# Altium footprint library WR-BHD.PcbLib: 220 footprints (part 10 of 14)
Each footprint in its own frame and in the unit in brackets; x right, y up, seen from the top. Pads: shape width x height; smd on the part's side, far side on the other; paste and mask are expansions set on the pad; w line width, h text height; cw(c..) or ccw(c..) is an arc to the next point about the centre after c.
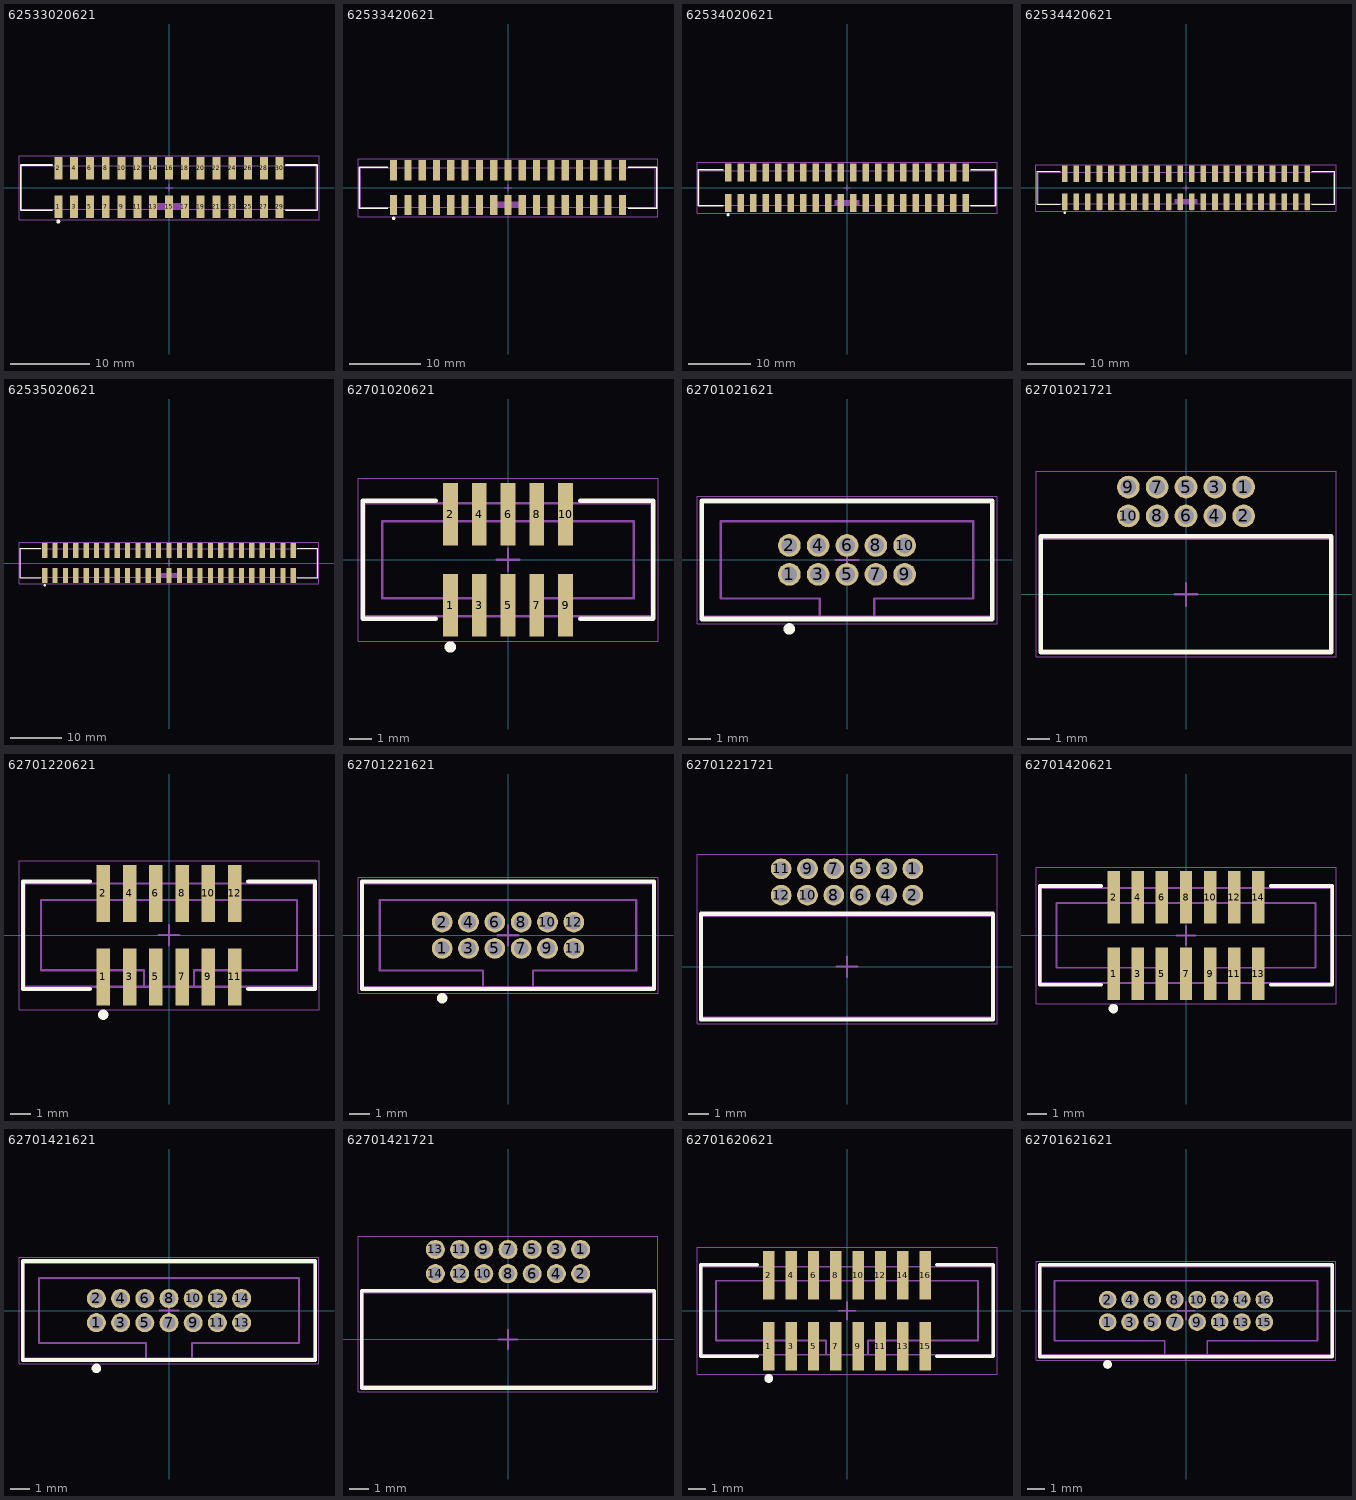
[diagram p9: the footprints below, top view; thin cyan lines are the x and y axes]

## 62533020621 [mm] "2.00mm Male SMT Box Header, 30p"
height 6.8
pads (30):
  rect 1x2.85 smd: 1(-14,-2.425) 2(-14,2.425) 3(-12,-2.425) 4(-12,2.425) 5(-10,-2.425) 6(-10,2.425) 7(-8,-2.425) 8(-8,2.425) 9(-6,-2.425) 10(-6,2.425) 11(-4,-2.425) 12(-4,2.425) 13(-2,-2.425) 14(-2,2.425) 15(0,-2.425) 16(0,2.425) 17(2,-2.425) 18(2,2.425) 19(4,-2.425) 20(4,2.425) 21(6,-2.425) 22(6,2.425) 23(8,-2.425) 24(8,2.425) 25(10,-2.425) 26(10,2.425) 27(12,-2.425) 28(12,2.425) 29(14,-2.425) 30(14,2.425)
Top Overlay:
  circle w0.25: c-14,-4.3 r0.125
  lines w0.2: -14.8,-2.85 -18.775,-2.85 -18.775,2.85 -14.8,2.85 ; 14.8,-2.85 18.775,-2.85 18.775,2.85 14.8,2.85
Top Assembly:
  rectangle: -2,-2.75 2,-1.95
  lines w0.1: -14.25,-2.75 -14.25,-3.75 -13.75,-3.75 -13.75,-2.75 ; -14.25,2.75 -14.25,3.75 -13.75,3.75 -13.75,2.75 ; -12.25,-2.75 -12.25,-3.75 -11.75,-3.75 -11.75,-2.75 ; -12.25,2.75 -12.25,3.75 -11.75,3.75 -11.75,2.75 ; -10.25,-2.75 -10.25,-3.75 -9.75,-3.75 -9.75,-2.75 ; -10.25,2.75 -10.25,3.75 -9.75,3.75 -9.75,2.75 ; -8.25,-2.75 -8.25,-3.75 -7.75,-3.75 -7.75,-2.75 ; -8.25,2.75 -8.25,3.75 -7.75,3.75 -7.75,2.75 ; -6.25,-2.75 -6.25,-3.75 -5.75,-3.75 -5.75,-2.75 ; -6.25,2.75 -6.25,3.75 -5.75,3.75 -5.75,2.75 ; -4.25,-2.75 -4.25,-3.75 -3.75,-3.75 -3.75,-2.75 ; -4.25,2.75 -4.25,3.75 -3.75,3.75 -3.75,2.75 ; -2.25,-2.75 -2.25,-3.75 -1.75,-3.75 -1.75,-2.75 ; -2.25,2.75 -2.25,3.75 -1.75,3.75 -1.75,2.75 ; -0.25,-2.75 -0.25,-3.75 0.25,-3.75 0.25,-2.75 ; -0.25,2.75 -0.25,3.75 0.25,3.75 0.25,2.75 ; 1.75,-2.75 1.75,-3.75 2.25,-3.75 2.25,-2.75 ; 1.75,2.75 1.75,3.75 2.25,3.75 2.25,2.75 ; 3.75,-2.75 3.75,-3.75 4.25,-3.75 4.25,-2.75 ; 3.75,2.75 3.75,3.75 4.25,3.75 4.25,2.75 ; 5.75,-2.75 5.75,-3.75 6.25,-3.75 6.25,-2.75 ; 5.75,2.75 5.75,3.75 6.25,3.75 6.25,2.75 ; 7.75,-2.75 7.75,-3.75 8.25,-3.75 8.25,-2.75 ; 7.75,2.75 7.75,3.75 8.25,3.75 8.25,2.75 ; 9.75,-2.75 9.75,-3.75 10.25,-3.75 10.25,-2.75 ; 9.75,2.75 9.75,3.75 10.25,3.75 10.25,2.75 ; 11.75,-2.75 11.75,-3.75 12.25,-3.75 12.25,-2.75 ; 11.75,2.75 11.75,3.75 12.25,3.75 12.25,2.75 ; 13.75,-2.75 13.75,-3.75 14.25,-3.75 14.25,-2.75 ; 13.75,2.75 13.75,3.75 14.25,3.75 14.25,2.75 ; -18.625,-2.75 18.625,-2.75 18.625,2.75 -18.625,2.75 -18.625,-2.75
Top Designator:
  text ".Designator" at -3.647,-0.357 h1
Top 3D Body:
  rectangle: -2,-2.75 2,-1.95
  lines w0.1: -14.25,-2.75 -14.25,-3.75 -13.75,-3.75 -13.75,-2.75 ; -14.25,2.75 -14.25,3.75 -13.75,3.75 -13.75,2.75 ; -12.25,-2.75 -12.25,-3.75 -11.75,-3.75 -11.75,-2.75 ; -12.25,2.75 -12.25,3.75 -11.75,3.75 -11.75,2.75 ; -10.25,-2.75 -10.25,-3.75 -9.75,-3.75 -9.75,-2.75 ; -10.25,2.75 -10.25,3.75 -9.75,3.75 -9.75,2.75 ; -8.25,-2.75 -8.25,-3.75 -7.75,-3.75 -7.75,-2.75 ; -8.25,2.75 -8.25,3.75 -7.75,3.75 -7.75,2.75 ; -6.25,-2.75 -6.25,-3.75 -5.75,-3.75 -5.75,-2.75 ; -6.25,2.75 -6.25,3.75 -5.75,3.75 -5.75,2.75 ; -4.25,-2.75 -4.25,-3.75 -3.75,-3.75 -3.75,-2.75 ; -4.25,2.75 -4.25,3.75 -3.75,3.75 -3.75,2.75 ; -2.25,-2.75 -2.25,-3.75 -1.75,-3.75 -1.75,-2.75 ; -2.25,2.75 -2.25,3.75 -1.75,3.75 -1.75,2.75 ; -0.25,-2.75 -0.25,-3.75 0.25,-3.75 0.25,-2.75 ; -0.25,2.75 -0.25,3.75 0.25,3.75 0.25,2.75 ; 1.75,-2.75 1.75,-3.75 2.25,-3.75 2.25,-2.75 ; 1.75,2.75 1.75,3.75 2.25,3.75 2.25,2.75 ; 3.75,-2.75 3.75,-3.75 4.25,-3.75 4.25,-2.75 ; 3.75,2.75 3.75,3.75 4.25,3.75 4.25,2.75 ; 5.75,-2.75 5.75,-3.75 6.25,-3.75 6.25,-2.75 ; 5.75,2.75 5.75,3.75 6.25,3.75 6.25,2.75 ; 7.75,-2.75 7.75,-3.75 8.25,-3.75 8.25,-2.75 ; 7.75,2.75 7.75,3.75 8.25,3.75 8.25,2.75 ; 9.75,-2.75 9.75,-3.75 10.25,-3.75 10.25,-2.75 ; 9.75,2.75 9.75,3.75 10.25,3.75 10.25,2.75 ; 11.75,-2.75 11.75,-3.75 12.25,-3.75 12.25,-2.75 ; 11.75,2.75 11.75,3.75 12.25,3.75 12.25,2.75 ; 13.75,-2.75 13.75,-3.75 14.25,-3.75 14.25,-2.75 ; 13.75,2.75 13.75,3.75 14.25,3.75 14.25,2.75 ; -18.625,-2.75 -18.625,2.75 18.625,2.75 18.625,-2.75 -18.625,-2.75
Top Courtyard:
  lines w0.05: -18.975,-4.05 -18.975,4.05 18.975,4.05 18.975,-4.05 -18.975,-4.05
Top Component Center:
  lines w0.1: -0.5,0 0.5,0 ; 0,-0.5 0,0.5
3D body "62533020621 (rev1).stp": height 8.55, standoff 0, extent -18.625,-3.75 18.625,3.75

## 62533420621 [mm] "2.00mm Male SMT Box Header, 34p"
height 6.8
pads (34):
  rect 1x2.85 smd: 1(-16,-2.425) 2(-16,2.425) 3(-14,-2.425) 4(-14,2.425) 5(-12,-2.425) 6(-12,2.425) 7(-10,-2.425) 8(-10,2.425) 9(-8,-2.425) 10(-8,2.425) 11(-6,-2.425) 12(-6,2.425) 13(-4,-2.425) 14(-4,2.425) 15(-2,-2.425) 16(-2,2.425) 17(0,-2.425) 18(0,2.425) 19(2,-2.425) 20(2,2.425) 21(4,-2.425) 22(4,2.425) 23(6,-2.425) 24(6,2.425) 25(8,-2.425) 26(8,2.425) 27(10,-2.425) 28(10,2.425) 29(12,-2.425) 30(12,2.425) 31(14,-2.425) 32(14,2.425) 33(16,-2.425) 34(16,2.425)
Top Overlay:
  circle w0.25: c-16,-4.3 r0.125
  lines w0.2: -16.8,-2.85 -20.775,-2.85 -20.775,2.85 -16.8,2.85 ; 16.8,-2.85 20.775,-2.85 20.775,2.85 16.8,2.85
Top Assembly:
  rectangle: -2,-2.75 2,-1.95
  lines w0.1: -16.25,-2.75 -16.25,-3.75 -15.75,-3.75 -15.75,-2.75 ; -16.25,2.75 -16.25,3.75 -15.75,3.75 -15.75,2.75 ; -14.25,-2.75 -14.25,-3.75 -13.75,-3.75 -13.75,-2.75 ; -14.25,2.75 -14.25,3.75 -13.75,3.75 -13.75,2.75 ; -12.25,-2.75 -12.25,-3.75 -11.75,-3.75 -11.75,-2.75 ; -12.25,2.75 -12.25,3.75 -11.75,3.75 -11.75,2.75 ; -10.25,-2.75 -10.25,-3.75 -9.75,-3.75 -9.75,-2.75 ; -10.25,2.75 -10.25,3.75 -9.75,3.75 -9.75,2.75 ; -8.25,-2.75 -8.25,-3.75 -7.75,-3.75 -7.75,-2.75 ; -8.25,2.75 -8.25,3.75 -7.75,3.75 -7.75,2.75 ; -6.25,-2.75 -6.25,-3.75 -5.75,-3.75 -5.75,-2.75 ; -6.25,2.75 -6.25,3.75 -5.75,3.75 -5.75,2.75 ; -4.25,-2.75 -4.25,-3.75 -3.75,-3.75 -3.75,-2.75 ; -4.25,2.75 -4.25,3.75 -3.75,3.75 -3.75,2.75 ; -2.25,-2.75 -2.25,-3.75 -1.75,-3.75 -1.75,-2.75 ; -2.25,2.75 -2.25,3.75 -1.75,3.75 -1.75,2.75 ; -0.25,-2.75 -0.25,-3.75 0.25,-3.75 0.25,-2.75 ; -0.25,2.75 -0.25,3.75 0.25,3.75 0.25,2.75 ; 1.75,-2.75 1.75,-3.75 2.25,-3.75 2.25,-2.75 ; 1.75,2.75 1.75,3.75 2.25,3.75 2.25,2.75 ; 3.75,-2.75 3.75,-3.75 4.25,-3.75 4.25,-2.75 ; 3.75,2.75 3.75,3.75 4.25,3.75 4.25,2.75 ; 5.75,-2.75 5.75,-3.75 6.25,-3.75 6.25,-2.75 ; 5.75,2.75 5.75,3.75 6.25,3.75 6.25,2.75 ; 7.75,-2.75 7.75,-3.75 8.25,-3.75 8.25,-2.75 ; 7.75,2.75 7.75,3.75 8.25,3.75 8.25,2.75 ; 9.75,-2.75 9.75,-3.75 10.25,-3.75 10.25,-2.75 ; 9.75,2.75 9.75,3.75 10.25,3.75 10.25,2.75 ; 11.75,-2.75 11.75,-3.75 12.25,-3.75 12.25,-2.75 ; 11.75,2.75 11.75,3.75 12.25,3.75 12.25,2.75 ; 13.75,-2.75 13.75,-3.75 14.25,-3.75 14.25,-2.75 ; 13.75,2.75 13.75,3.75 14.25,3.75 14.25,2.75 ; 15.75,-2.75 15.75,-3.75 16.25,-3.75 16.25,-2.75 ; 15.75,2.75 15.75,3.75 16.25,3.75 16.25,2.75 ; -20.625,-2.75 -20.625,2.75 20.625,2.75 20.625,-2.75 -20.625,-2.75
Top Designator:
  text ".Designator" at -3.647,-0.357 h1
Top 3D Body:
  rectangle: -2,-2.75 2,-1.95
  lines w0.1: -16.25,-2.75 -16.25,-3.75 -15.75,-3.75 -15.75,-2.75 ; -16.25,2.75 -16.25,3.75 -15.75,3.75 -15.75,2.75 ; -14.25,-2.75 -14.25,-3.75 -13.75,-3.75 -13.75,-2.75 ; -14.25,2.75 -14.25,3.75 -13.75,3.75 -13.75,2.75 ; -12.25,-2.75 -12.25,-3.75 -11.75,-3.75 -11.75,-2.75 ; -12.25,2.75 -12.25,3.75 -11.75,3.75 -11.75,2.75 ; -10.25,-2.75 -10.25,-3.75 -9.75,-3.75 -9.75,-2.75 ; -10.25,2.75 -10.25,3.75 -9.75,3.75 -9.75,2.75 ; -8.25,-2.75 -8.25,-3.75 -7.75,-3.75 -7.75,-2.75 ; -8.25,2.75 -8.25,3.75 -7.75,3.75 -7.75,2.75 ; -6.25,-2.75 -6.25,-3.75 -5.75,-3.75 -5.75,-2.75 ; -6.25,2.75 -6.25,3.75 -5.75,3.75 -5.75,2.75 ; -4.25,-2.75 -4.25,-3.75 -3.75,-3.75 -3.75,-2.75 ; -4.25,2.75 -4.25,3.75 -3.75,3.75 -3.75,2.75 ; -2.25,-2.75 -2.25,-3.75 -1.75,-3.75 -1.75,-2.75 ; -2.25,2.75 -2.25,3.75 -1.75,3.75 -1.75,2.75 ; -0.25,-2.75 -0.25,-3.75 0.25,-3.75 0.25,-2.75 ; -0.25,2.75 -0.25,3.75 0.25,3.75 0.25,2.75 ; 1.75,-2.75 1.75,-3.75 2.25,-3.75 2.25,-2.75 ; 1.75,2.75 1.75,3.75 2.25,3.75 2.25,2.75 ; 3.75,-2.75 3.75,-3.75 4.25,-3.75 4.25,-2.75 ; 3.75,2.75 3.75,3.75 4.25,3.75 4.25,2.75 ; 5.75,-2.75 5.75,-3.75 6.25,-3.75 6.25,-2.75 ; 5.75,2.75 5.75,3.75 6.25,3.75 6.25,2.75 ; 7.75,-2.75 7.75,-3.75 8.25,-3.75 8.25,-2.75 ; 7.75,2.75 7.75,3.75 8.25,3.75 8.25,2.75 ; 9.75,-2.75 9.75,-3.75 10.25,-3.75 10.25,-2.75 ; 9.75,2.75 9.75,3.75 10.25,3.75 10.25,2.75 ; 11.75,-2.75 11.75,-3.75 12.25,-3.75 12.25,-2.75 ; 11.75,2.75 11.75,3.75 12.25,3.75 12.25,2.75 ; 13.75,-2.75 13.75,-3.75 14.25,-3.75 14.25,-2.75 ; 13.75,2.75 13.75,3.75 14.25,3.75 14.25,2.75 ; 15.75,-2.75 15.75,-3.75 16.25,-3.75 16.25,-2.75 ; 15.75,2.75 15.75,3.75 16.25,3.75 16.25,2.75 ; -20.625,-2.75 20.625,-2.75 20.625,2.75 -20.625,2.75 -20.625,-2.75
Top Courtyard:
  lines w0.05: -20.975,-4.05 20.975,-4.05 20.975,4.05 -20.975,4.05 -20.975,-4.05
Top Component Center:
  lines w0.1: -0.5,0 0.5,0 ; 0,-0.5 0,0.5
3D body "62533420621 (rev1).stp": height 8.55, standoff 0, extent -20.625,-3.75 20.625,3.75

## 62534020621 [mm] "2.00mm Male SMT Box Header, 40p"
height 6.8
pads (40):
  rect 1x2.85 smd: 1(-19,-2.425) 2(-19,2.425) 3(-17,-2.425) 4(-17,2.425) 5(-15,-2.425) 6(-15,2.425) 7(-13,-2.425) 8(-13,2.425) 9(-11,-2.425) 10(-11,2.425) 11(-9,-2.425) 12(-9,2.425) 13(-7,-2.425) 14(-7,2.425) 15(-5,-2.425) 16(-5,2.425) 17(-3,-2.425) 18(-3,2.425) 19(-1,-2.425) 20(-1,2.425) 21(1,-2.425) 22(1,2.425) 23(3,-2.425) 24(3,2.425) 25(5,-2.425) 26(5,2.425) 27(7,-2.425) 28(7,2.425) 29(9,-2.425) 30(9,2.425) 31(11,-2.425) 32(11,2.425) 33(13,-2.425) 34(13,2.425) 35(15,-2.425) 36(15,2.425) 37(17,-2.425) 38(17,2.425) 39(19,-2.425) 40(19,2.425)
Top Overlay:
  circle w0.25: c-19,-4.3 r0.125
  lines w0.2: -19.8,-2.85 -23.775,-2.85 -23.775,2.85 -19.8,2.85 ; 19.8,-2.85 23.775,-2.85 23.775,2.85 19.8,2.85
Top Assembly:
  rectangle: -2,-2.75 2,-1.95
  lines w0.1: -19.25,-2.75 -19.25,-3.75 -18.75,-3.75 -18.75,-2.75 ; -19.25,2.75 -19.25,3.75 -18.75,3.75 -18.75,2.75 ; -17.25,-2.75 -17.25,-3.75 -16.75,-3.75 -16.75,-2.75 ; -17.25,2.75 -17.25,3.75 -16.75,3.75 -16.75,2.75 ; -15.25,-2.75 -15.25,-3.75 -14.75,-3.75 -14.75,-2.75 ; -15.25,2.75 -15.25,3.75 -14.75,3.75 -14.75,2.75 ; -13.25,-2.75 -13.25,-3.75 -12.75,-3.75 -12.75,-2.75 ; -13.25,2.75 -13.25,3.75 -12.75,3.75 -12.75,2.75 ; -11.25,-2.75 -11.25,-3.75 -10.75,-3.75 -10.75,-2.75 ; -11.25,2.75 -11.25,3.75 -10.75,3.75 -10.75,2.75 ; -9.25,-2.75 -9.25,-3.75 -8.75,-3.75 -8.75,-2.75 ; -9.25,2.75 -9.25,3.75 -8.75,3.75 -8.75,2.75 ; -7.25,-2.75 -7.25,-3.75 -6.75,-3.75 -6.75,-2.75 ; -7.25,2.75 -7.25,3.75 -6.75,3.75 -6.75,2.75 ; -5.25,-2.75 -5.25,-3.75 -4.75,-3.75 -4.75,-2.75 ; -5.25,2.75 -5.25,3.75 -4.75,3.75 -4.75,2.75 ; -3.25,-2.75 -3.25,-3.75 -2.75,-3.75 -2.75,-2.75 ; -3.25,2.75 -3.25,3.75 -2.75,3.75 -2.75,2.75 ; -1.25,-2.75 -1.25,-3.75 -0.75,-3.75 -0.75,-2.75 ; -1.25,2.75 -1.25,3.75 -0.75,3.75 -0.75,2.75 ; 0.75,-2.75 0.75,-3.75 1.25,-3.75 1.25,-2.75 ; 0.75,2.75 0.75,3.75 1.25,3.75 1.25,2.75 ; 2.75,-2.75 2.75,-3.75 3.25,-3.75 3.25,-2.75 ; 2.75,2.75 2.75,3.75 3.25,3.75 3.25,2.75 ; 4.75,-2.75 4.75,-3.75 5.25,-3.75 5.25,-2.75 ; 4.75,2.75 4.75,3.75 5.25,3.75 5.25,2.75 ; 6.75,-2.75 6.75,-3.75 7.25,-3.75 7.25,-2.75 ; 6.75,2.75 6.75,3.75 7.25,3.75 7.25,2.75 ; 8.75,-2.75 8.75,-3.75 9.25,-3.75 9.25,-2.75 ; 8.75,2.75 8.75,3.75 9.25,3.75 9.25,2.75 ; 10.75,-2.75 10.75,-3.75 11.25,-3.75 11.25,-2.75 ; 10.75,2.75 10.75,3.75 11.25,3.75 11.25,2.75 ; 12.75,-2.75 12.75,-3.75 13.25,-3.75 13.25,-2.75 ; 12.75,2.75 12.75,3.75 13.25,3.75 13.25,2.75 ; 14.75,-2.75 14.75,-3.75 15.25,-3.75 15.25,-2.75 ; 14.75,2.75 14.75,3.75 15.25,3.75 15.25,2.75 ; 16.75,-2.75 16.75,-3.75 17.25,-3.75 17.25,-2.75 ; 16.75,2.75 16.75,3.75 17.25,3.75 17.25,2.75 ; 18.75,-2.75 18.75,-3.75 19.25,-3.75 19.25,-2.75 ; 18.75,2.75 18.75,3.75 19.25,3.75 19.25,2.75 ; -23.625,-2.75 23.625,-2.75 23.625,2.75 -23.625,2.75 -23.625,-2.75
Top Designator:
  text ".Designator" at -3.647,-0.357 h1
Top 3D Body:
  rectangle: -2,-2.75 2,-1.95
  lines w0.1: -19.25,-2.75 -19.25,-3.75 -18.75,-3.75 -18.75,-2.75 ; -19.25,2.75 -19.25,3.75 -18.75,3.75 -18.75,2.75 ; -17.25,-2.75 -17.25,-3.75 -16.75,-3.75 -16.75,-2.75 ; -17.25,2.75 -17.25,3.75 -16.75,3.75 -16.75,2.75 ; -15.25,-2.75 -15.25,-3.75 -14.75,-3.75 -14.75,-2.75 ; -15.25,2.75 -15.25,3.75 -14.75,3.75 -14.75,2.75 ; -13.25,-2.75 -13.25,-3.75 -12.75,-3.75 -12.75,-2.75 ; -13.25,2.75 -13.25,3.75 -12.75,3.75 -12.75,2.75 ; -11.25,-2.75 -11.25,-3.75 -10.75,-3.75 -10.75,-2.75 ; -11.25,2.75 -11.25,3.75 -10.75,3.75 -10.75,2.75 ; -9.25,-2.75 -9.25,-3.75 -8.75,-3.75 -8.75,-2.75 ; -9.25,2.75 -9.25,3.75 -8.75,3.75 -8.75,2.75 ; -7.25,-2.75 -7.25,-3.75 -6.75,-3.75 -6.75,-2.75 ; -7.25,2.75 -7.25,3.75 -6.75,3.75 -6.75,2.75 ; -5.25,-2.75 -5.25,-3.75 -4.75,-3.75 -4.75,-2.75 ; -5.25,2.75 -5.25,3.75 -4.75,3.75 -4.75,2.75 ; -3.25,-2.75 -3.25,-3.75 -2.75,-3.75 -2.75,-2.75 ; -3.25,2.75 -3.25,3.75 -2.75,3.75 -2.75,2.75 ; -1.25,-2.75 -1.25,-3.75 -0.75,-3.75 -0.75,-2.75 ; -1.25,2.75 -1.25,3.75 -0.75,3.75 -0.75,2.75 ; 0.75,-2.75 0.75,-3.75 1.25,-3.75 1.25,-2.75 ; 0.75,2.75 0.75,3.75 1.25,3.75 1.25,2.75 ; 2.75,-2.75 2.75,-3.75 3.25,-3.75 3.25,-2.75 ; 2.75,2.75 2.75,3.75 3.25,3.75 3.25,2.75 ; 4.75,-2.75 4.75,-3.75 5.25,-3.75 5.25,-2.75 ; 4.75,2.75 4.75,3.75 5.25,3.75 5.25,2.75 ; 6.75,-2.75 6.75,-3.75 7.25,-3.75 7.25,-2.75 ; 6.75,2.75 6.75,3.75 7.25,3.75 7.25,2.75 ; 8.75,-2.75 8.75,-3.75 9.25,-3.75 9.25,-2.75 ; 8.75,2.75 8.75,3.75 9.25,3.75 9.25,2.75 ; 10.75,-2.75 10.75,-3.75 11.25,-3.75 11.25,-2.75 ; 10.75,2.75 10.75,3.75 11.25,3.75 11.25,2.75 ; 12.75,-2.75 12.75,-3.75 13.25,-3.75 13.25,-2.75 ; 12.75,2.75 12.75,3.75 13.25,3.75 13.25,2.75 ; 14.75,-2.75 14.75,-3.75 15.25,-3.75 15.25,-2.75 ; 14.75,2.75 14.75,3.75 15.25,3.75 15.25,2.75 ; 16.75,-2.75 16.75,-3.75 17.25,-3.75 17.25,-2.75 ; 16.75,2.75 16.75,3.75 17.25,3.75 17.25,2.75 ; 18.75,-2.75 18.75,-3.75 19.25,-3.75 19.25,-2.75 ; 18.75,2.75 18.75,3.75 19.25,3.75 19.25,2.75 ; -23.625,-2.75 -23.625,2.75 23.625,2.75 23.625,-2.75 -23.625,-2.75
Top Courtyard:
  lines w0.05: -23.975,-4.05 -23.975,4.05 23.975,4.05 23.975,-4.05 -23.975,-4.05
Top Component Center:
  lines w0.1: -0.5,0 0.5,0 ; 0,-0.5 0,0.5
3D body "62534020621 (rev1).stp": height 8.55, standoff 0, extent -23.625,-3.75 23.625,3.75

## 62534420621 [mm] "2.00mm Male SMT Box Header, 44p"
height 6.8
pads (44):
  rect 1x2.85 smd: 1(-21,-2.425) 2(-21,2.425) 3(-19,-2.425) 4(-19,2.425) 5(-17,-2.425) 6(-17,2.425) 7(-15,-2.425) 8(-15,2.425) 9(-13,-2.425) 10(-13,2.425) 11(-11,-2.425) 12(-11,2.425) 13(-9,-2.425) 14(-9,2.425) 15(-7,-2.425) 16(-7,2.425) 17(-5,-2.425) 18(-5,2.425) 19(-3,-2.425) 20(-3,2.425) 21(-1,-2.425) 22(-1,2.425) 23(1,-2.425) 24(1,2.425) 25(3,-2.425) 26(3,2.425) 27(5,-2.425) 28(5,2.425) 29(7,-2.425) 30(7,2.425) 31(9,-2.425) 32(9,2.425) 33(11,-2.425) 34(11,2.425) 35(13,-2.425) 36(13,2.425) 37(15,-2.425) 38(15,2.425) 39(17,-2.425) 40(17,2.425) 41(19,-2.425) 42(19,2.425) 43(21,-2.425) 44(21,2.425)
Top Overlay:
  circle w0.25: c-21,-4.3 r0.125
  lines w0.2: -21.8,-2.85 -25.775,-2.85 -25.775,2.85 -21.8,2.85 ; 21.8,-2.85 25.775,-2.85 25.775,2.85 21.8,2.85
Top Assembly:
  rectangle: -2,-2.75 2,-1.95
  lines w0.1: -21.25,-2.75 -21.25,-3.75 -20.75,-3.75 -20.75,-2.75 ; -21.25,2.75 -21.25,3.75 -20.75,3.75 -20.75,2.75 ; -19.25,-2.75 -19.25,-3.75 -18.75,-3.75 -18.75,-2.75 ; -19.25,2.75 -19.25,3.75 -18.75,3.75 -18.75,2.75 ; -17.25,-2.75 -17.25,-3.75 -16.75,-3.75 -16.75,-2.75 ; -17.25,2.75 -17.25,3.75 -16.75,3.75 -16.75,2.75 ; -15.25,-2.75 -15.25,-3.75 -14.75,-3.75 -14.75,-2.75 ; -15.25,2.75 -15.25,3.75 -14.75,3.75 -14.75,2.75 ; -13.25,-2.75 -13.25,-3.75 -12.75,-3.75 -12.75,-2.75 ; -13.25,2.75 -13.25,3.75 -12.75,3.75 -12.75,2.75 ; -11.25,-2.75 -11.25,-3.75 -10.75,-3.75 -10.75,-2.75 ; -11.25,2.75 -11.25,3.75 -10.75,3.75 -10.75,2.75 ; -9.25,-2.75 -9.25,-3.75 -8.75,-3.75 -8.75,-2.75 ; -9.25,2.75 -9.25,3.75 -8.75,3.75 -8.75,2.75 ; -7.25,-2.75 -7.25,-3.75 -6.75,-3.75 -6.75,-2.75 ; -7.25,2.75 -7.25,3.75 -6.75,3.75 -6.75,2.75 ; -5.25,-2.75 -5.25,-3.75 -4.75,-3.75 -4.75,-2.75 ; -5.25,2.75 -5.25,3.75 -4.75,3.75 -4.75,2.75 ; -3.25,-2.75 -3.25,-3.75 -2.75,-3.75 -2.75,-2.75 ; -3.25,2.75 -3.25,3.75 -2.75,3.75 -2.75,2.75 ; -1.25,-2.75 -1.25,-3.75 -0.75,-3.75 -0.75,-2.75 ; -1.25,2.75 -1.25,3.75 -0.75,3.75 -0.75,2.75 ; 0.75,-2.75 0.75,-3.75 1.25,-3.75 1.25,-2.75 ; 0.75,2.75 0.75,3.75 1.25,3.75 1.25,2.75 ; 2.75,-2.75 2.75,-3.75 3.25,-3.75 3.25,-2.75 ; 2.75,2.75 2.75,3.75 3.25,3.75 3.25,2.75 ; 4.75,-2.75 4.75,-3.75 5.25,-3.75 5.25,-2.75 ; 4.75,2.75 4.75,3.75 5.25,3.75 5.25,2.75 ; 6.75,-2.75 6.75,-3.75 7.25,-3.75 7.25,-2.75 ; 6.75,2.75 6.75,3.75 7.25,3.75 7.25,2.75 ; 8.75,-2.75 8.75,-3.75 9.25,-3.75 9.25,-2.75 ; 8.75,2.75 8.75,3.75 9.25,3.75 9.25,2.75 ; 10.75,-2.75 10.75,-3.75 11.25,-3.75 11.25,-2.75 ; 10.75,2.75 10.75,3.75 11.25,3.75 11.25,2.75 ; 12.75,-2.75 12.75,-3.75 13.25,-3.75 13.25,-2.75 ; 12.75,2.75 12.75,3.75 13.25,3.75 13.25,2.75 ; 14.75,-2.75 14.75,-3.75 15.25,-3.75 15.25,-2.75 ; 14.75,2.75 14.75,3.75 15.25,3.75 15.25,2.75 ; 16.75,-2.75 16.75,-3.75 17.25,-3.75 17.25,-2.75 ; 16.75,2.75 16.75,3.75 17.25,3.75 17.25,2.75 ; 18.75,-2.75 18.75,-3.75 19.25,-3.75 19.25,-2.75 ; 18.75,2.75 18.75,3.75 19.25,3.75 19.25,2.75 ; 20.75,-2.75 20.75,-3.75 21.25,-3.75 21.25,-2.75 ; 20.75,2.75 20.75,3.75 21.25,3.75 21.25,2.75 ; -25.625,-2.75 25.625,-2.75 25.625,2.75 -25.625,2.75 -25.625,-2.75
Top Designator:
  text ".Designator" at -3.647,-0.357 h1
Top 3D Body:
  rectangle: -2,-2.75 2,-1.95
  lines w0.1: -21.25,-2.75 -21.25,-3.75 -20.75,-3.75 -20.75,-2.75 ; -21.25,2.75 -21.25,3.75 -20.75,3.75 -20.75,2.75 ; -19.25,-2.75 -19.25,-3.75 -18.75,-3.75 -18.75,-2.75 ; -19.25,2.75 -19.25,3.75 -18.75,3.75 -18.75,2.75 ; -17.25,-2.75 -17.25,-3.75 -16.75,-3.75 -16.75,-2.75 ; -17.25,2.75 -17.25,3.75 -16.75,3.75 -16.75,2.75 ; -15.25,-2.75 -15.25,-3.75 -14.75,-3.75 -14.75,-2.75 ; -15.25,2.75 -15.25,3.75 -14.75,3.75 -14.75,2.75 ; -13.25,-2.75 -13.25,-3.75 -12.75,-3.75 -12.75,-2.75 ; -13.25,2.75 -13.25,3.75 -12.75,3.75 -12.75,2.75 ; -11.25,-2.75 -11.25,-3.75 -10.75,-3.75 -10.75,-2.75 ; -11.25,2.75 -11.25,3.75 -10.75,3.75 -10.75,2.75 ; -9.25,-2.75 -9.25,-3.75 -8.75,-3.75 -8.75,-2.75 ; -9.25,2.75 -9.25,3.75 -8.75,3.75 -8.75,2.75 ; -7.25,-2.75 -7.25,-3.75 -6.75,-3.75 -6.75,-2.75 ; -7.25,2.75 -7.25,3.75 -6.75,3.75 -6.75,2.75 ; -5.25,-2.75 -5.25,-3.75 -4.75,-3.75 -4.75,-2.75 ; -5.25,2.75 -5.25,3.75 -4.75,3.75 -4.75,2.75 ; -3.25,-2.75 -3.25,-3.75 -2.75,-3.75 -2.75,-2.75 ; -3.25,2.75 -3.25,3.75 -2.75,3.75 -2.75,2.75 ; -1.25,-2.75 -1.25,-3.75 -0.75,-3.75 -0.75,-2.75 ; -1.25,2.75 -1.25,3.75 -0.75,3.75 -0.75,2.75 ; 0.75,-2.75 0.75,-3.75 1.25,-3.75 1.25,-2.75 ; 0.75,2.75 0.75,3.75 1.25,3.75 1.25,2.75 ; 2.75,-2.75 2.75,-3.75 3.25,-3.75 3.25,-2.75 ; 2.75,2.75 2.75,3.75 3.25,3.75 3.25,2.75 ; 4.75,-2.75 4.75,-3.75 5.25,-3.75 5.25,-2.75 ; 4.75,2.75 4.75,3.75 5.25,3.75 5.25,2.75 ; 6.75,-2.75 6.75,-3.75 7.25,-3.75 7.25,-2.75 ; 6.75,2.75 6.75,3.75 7.25,3.75 7.25,2.75 ; 8.75,-2.75 8.75,-3.75 9.25,-3.75 9.25,-2.75 ; 8.75,2.75 8.75,3.75 9.25,3.75 9.25,2.75 ; 10.75,-2.75 10.75,-3.75 11.25,-3.75 11.25,-2.75 ; 10.75,2.75 10.75,3.75 11.25,3.75 11.25,2.75 ; 12.75,-2.75 12.75,-3.75 13.25,-3.75 13.25,-2.75 ; 12.75,2.75 12.75,3.75 13.25,3.75 13.25,2.75 ; 14.75,-2.75 14.75,-3.75 15.25,-3.75 15.25,-2.75 ; 14.75,2.75 14.75,3.75 15.25,3.75 15.25,2.75 ; 16.75,-2.75 16.75,-3.75 17.25,-3.75 17.25,-2.75 ; 16.75,2.75 16.75,3.75 17.25,3.75 17.25,2.75 ; 18.75,-2.75 18.75,-3.75 19.25,-3.75 19.25,-2.75 ; 18.75,2.75 18.75,3.75 19.25,3.75 19.25,2.75 ; 20.75,-2.75 20.75,-3.75 21.25,-3.75 21.25,-2.75 ; 20.75,2.75 20.75,3.75 21.25,3.75 21.25,2.75 ; -25.625,-2.75 -25.625,2.75 25.625,2.75 25.625,-2.75 -25.625,-2.75
Top Courtyard:
  lines w0.05: -25.975,-4.05 -25.975,4.05 25.975,4.05 25.975,-4.05 -25.975,-4.05
Top Component Center:
  lines w0.1: -0.5,0 0.5,0 ; 0,-0.5 0,0.5
3D body "62534420621 (rev1).stp": height 8.55, standoff 0, extent -25.625,-3.75 25.625,3.75

## 62535020621 [mm] "2.00mm Male SMT Box Header, 50p"
height 6.8
pads (50):
  rect 1x2.85 smd: 1(-24,-2.425) 2(-24,2.425) 3(-22,-2.425) 4(-22,2.425) 5(-20,-2.425) 6(-20,2.425) 7(-18,-2.425) 8(-18,2.425) 9(-16,-2.425) 10(-16,2.425) 11(-14,-2.425) 12(-14,2.425) 13(-12,-2.425) 14(-12,2.425) 15(-10,-2.425) 16(-10,2.425) 17(-8,-2.425) 18(-8,2.425) 19(-6,-2.425) 20(-6,2.425) 21(-4,-2.425) 22(-4,2.425) 23(-2,-2.425) 24(-2,2.425) 25(0,-2.425) 26(0,2.425) 27(2,-2.425) 28(2,2.425) 29(4,-2.425) 30(4,2.425) 31(6,-2.425) 32(6,2.425) 33(8,-2.425) 34(8,2.425) 35(10,-2.425) 36(10,2.425) 37(12,-2.425) 38(12,2.425) 39(14,-2.425) 40(14,2.425) 41(16,-2.425) 42(16,2.425) 43(18,-2.425) 44(18,2.425) 45(20,-2.425) 46(20,2.425) 47(22,-2.425) 48(22,2.425) 49(24,-2.425) 50(24,2.425)
Top Overlay:
  circle w0.25: c-24,-4.3 r0.125
  lines w0.2: -24.8,-2.85 -28.775,-2.85 -28.775,2.85 -24.8,2.85 ; 24.8,-2.85 28.775,-2.85 28.775,2.85 24.8,2.85
Top Assembly:
  drawing of 155 lines, arcs and shapes, not listed
Top Designator:
  text ".Designator" at -3.647,-0.357 h1
Top 3D Body:
  drawing of 155 lines, arcs and shapes, not listed
Top Courtyard:
  lines w0.05: -28.975,-4.05 -28.975,4.05 28.975,4.05 28.975,-4.05 -28.975,-4.05
Top Component Center:
  lines w0.1: -0.5,0 0.5,0 ; 0,-0.5 0,0.5
3D body "62535020621 (rev1).stp": height 8.55, standoff 0, extent -28.625,-3.75 28.625,3.75

## 62701020621 [mm] "Boc Header SMT type, 10p"
height 5.3
pads (10):
  rect 0.65x2.76 smd: 1(-2.54,-2.02) 2(-2.54,2.02) 3(-1.27,-2.02) 4(-1.27,2.02) 5(0,-2.02) 6(0,2.02) 7(1.27,-2.02) 8(1.27,2.02) 9(2.54,-2.02) 10(2.54,2.02)
Top Overlay:
  circle w0.25: c-2.55,-3.85 r0.125
  lines w0.2: -3.2,-2.6 -6.425,-2.6 -6.425,2.6 -3.2,2.6 ; 3.2,-2.6 6.425,-2.6 6.425,2.6 3.2,2.6
Top Assembly:
  lines w0.1: -1.2,-2.5 -1.2,-1.7 -5.55,-1.7 -5.55,1.7 5.55,1.7 5.55,-1.7 1.2,-1.7 1.2,-2.5 ; -6.35,-2.5 -6.35,2.5 6.35,2.5 6.35,-2.5 -6.35,-2.5
Top Designator:
  text ".Designator" at -3.647,-0.357 h1
Top 3D Body:
  lines w0.1: -1.2,-2.5 -1.2,-1.7 -5.55,-1.7 -5.55,1.7 5.55,1.7 5.55,-1.7 1.2,-1.7 1.2,-2.5 ; -6.35,-2.5 6.35,-2.5 6.35,2.5 -6.35,2.5 -6.35,-2.5
Top Courtyard:
  lines w0.05: -6.625,-3.6 -6.625,3.6 6.625,3.6 6.625,-3.6 -6.625,-3.6
Top Component Center:
  lines w0.1: -0.5,0 0.5,0 ; 0,-0.5 0,0.5
3D body "62701020621.stp": height 5.2, standoff 0, extent -6.35,-2.8 6.35,2.8

## 62701021621 [mm] "1.27x1.27mm Pitch Box Header Straight Type, 10p"
height 4.9
pads (10):
  round 1 hole 0.7: 1(-2.54,-0.635) 2(-2.54,0.635) 3(-1.27,-0.635) 4(-1.27,0.635) 5(0,-0.635) 6(0,0.635) 7(1.27,-0.635) 8(1.27,0.635) 9(2.54,-0.635) 10(2.54,0.635)
Top Overlay:
  circle w0.25: c-2.54,-3.035 r0.125
  lines w0.2: -6.4,-2.6 6.4,-2.6 6.4,2.6 -6.4,2.6 -6.4,-2.6
Top Assembly:
  lines w0.1: -1.2,-2.5 -1.2,-1.7 -5.55,-1.7 -5.55,1.7 5.55,1.7 5.55,-1.7 1.2,-1.7 1.2,-2.5 ; -6.35,-2.5 6.35,-2.5 6.35,2.5 -6.35,2.5 -6.35,-2.5
Top Designator:
  text ".Designator" at -3.647,-0.357 h1
Top 3D Body:
  lines w0.1: -1.2,-2.5 -1.2,-1.7 -5.55,-1.7 -5.55,1.7 5.55,1.7 5.55,-1.7 1.2,-1.7 1.2,-2.5 ; -6.35,-2.5 -6.35,2.5 6.35,2.5 6.35,-2.5 -6.35,-2.5
Top Courtyard:
  lines w0.05: -6.6,-2.8 6.6,-2.8 6.6,2.8 -6.6,2.8 -6.6,-2.8
Top Component Center:
  lines w0.1: -0.5,0 0.5,0 ; 0,-0.5 0,0.5
3D body "62701021621.stp": height 4.93, standoff -2.37, extent -6.35,-2.55 6.35,2.5

## 62701021721 [mm] "1.27x1.27mm Pitch Box Header Right Angle Type, 10p"
height 5
pads (10):
  round 1 hole 0.7: 1(2.54,4.72) 2(2.54,3.45) 3(1.27,4.72) 4(1.27,3.45) 5(0,4.72) 6(0,3.45) 7(-1.27,4.72) 8(-1.27,3.45) 9(-2.54,4.72) 10(-2.54,3.45)
Top Overlay:
  lines w0.2: -6.4,-2.55 -6.4,2.55 6.4,2.55 6.4,-2.55 -6.4,-2.55
Top Assembly:
  lines w0.1: -6.35,-2.45 6.35,-2.45 6.35,2.45 -6.35,2.45 -6.35,-2.45
Top Designator:
  text ".Designator" at -3.647,-0.357 h1
Top 3D Body:
  lines w0.1: -6.35,-2.45 -6.35,2.45 6.35,2.45 6.35,-2.45 -6.35,-2.45
Top Courtyard:
  lines w0.05: -6.6,-2.75 -6.6,5.42 6.6,5.42 6.6,-2.75 -6.6,-2.75
Top Component Center:
  lines w0.1: -0.5,0 0.5,0 ; 0,-0.5 0,0.5
3D body "62701021721.stp": height 5.08, standoff -2.37, extent -6.35,-2.45 6.35,4.92

## 62701220621 [mm] "Boc Header SMT type, 12p"
height 5.3
pads (12):
  rect 0.65x2.76 smd: 1(-3.175,-2.02) 2(-3.175,2.02) 3(-1.905,-2.02) 4(-1.905,2.02) 5(-0.635,-2.02) 6(-0.635,2.02) 7(0.635,-2.02) 8(0.635,2.02) 9(1.905,-2.02) 10(1.905,2.02) 11(3.175,-2.02) 12(3.175,2.02)
Top Overlay:
  circle w0.25: c-3.185,-3.85 r0.125
  lines w0.2: -3.835,-2.6 -7.06,-2.6 -7.06,2.6 -3.835,2.6 ; 3.835,-2.6 7.06,-2.6 7.06,2.6 3.835,2.6
Top Assembly:
  lines w0.1: -1.2,-2.5 -1.2,-1.7 -6.185,-1.7 -6.185,1.7 6.185,1.7 6.185,-1.7 1.2,-1.7 1.2,-2.5 ; -6.985,-2.5 6.985,-2.5 6.985,2.5 -6.985,2.5 -6.985,-2.5
Top Designator:
  text ".Designator" at -3.647,-0.357 h1
Top 3D Body:
  lines w0.1: -1.2,-2.5 -1.2,-1.7 -6.185,-1.7 -6.185,1.7 6.185,1.7 6.185,-1.7 1.2,-1.7 1.2,-2.5 ; -6.985,-2.5 -6.985,2.5 6.985,2.5 6.985,-2.5 -6.985,-2.5
Top Courtyard:
  lines w0.05: -7.26,-3.6 7.26,-3.6 7.26,3.6 -7.26,3.6 -7.26,-3.6
Top Component Center:
  lines w0.1: -0.5,0 0.5,0 ; 0,-0.5 0,0.5
3D body "62701220621.stp": height 5.2, standoff -0.04, extent -6.985,-2.8 6.985,2.8

## 62701221621 [mm] "1.27x1.27mm Pitch Box Header Straight Type, 12p"
height 4.9
pads (12):
  round 1 hole 0.7: 1(-3.175,-0.635) 2(-3.175,0.635) 3(-1.905,-0.635) 4(-1.905,0.635) 5(-0.635,-0.635) 6(-0.635,0.635) 7(0.635,-0.635) 8(0.635,0.635) 9(1.905,-0.635) 10(1.905,0.635) 11(3.175,-0.635) 12(3.175,0.635)
Top Overlay:
  circle w0.25: c-3.175,-3.035 r0.125
  lines w0.2: -7.035,-2.6 7.035,-2.6 7.035,2.6 -7.035,2.6 -7.035,-2.6
Top Assembly:
  lines w0.1: -1.2,-2.5 -1.2,-1.7 -6.185,-1.7 -6.185,1.7 6.185,1.7 6.185,-1.7 1.2,-1.7 1.2,-2.5 ; -6.985,-2.5 6.985,-2.5 6.985,2.5 -6.985,2.5 -6.985,-2.5
Top Designator:
  text ".Designator" at -3.647,-0.357 h1
Top 3D Body:
  lines w0.1: -1.2,-2.5 -1.2,-1.7 -6.185,-1.7 -6.185,1.7 6.185,1.7 6.185,-1.7 1.2,-1.7 1.2,-2.5 ; -6.985,-2.5 -6.985,2.5 6.985,2.5 6.985,-2.5 -6.985,-2.5
Top Courtyard:
  lines w0.05: -7.235,-2.8 7.235,-2.8 7.235,2.8 -7.235,2.8 -7.235,-2.8
Top Component Center:
  lines w0.1: -0.5,0 0.5,0 ; 0,-0.5 0,0.5
3D body "62701221621.stp": height 4.93, standoff -2.37, extent -6.985,-2.55 6.985,2.5

## 62701221721 [mm] "1.27x1.27mm Pitch Box Header Right Angle Type, 12p"
height 5
pads (12):
  round 1 hole 0.7: 1(3.175,4.72) 2(3.175,3.45) 3(1.905,4.72) 4(1.905,3.45) 5(0.635,4.72) 6(0.635,3.45) 7(-0.635,4.72) 8(-0.635,3.45) 9(-1.905,4.72) 10(-1.905,3.45) 11(-3.175,4.72) 12(-3.175,3.45)
Top Overlay:
  lines w0.2: -7.035,-2.55 -7.035,2.55 7.035,2.55 7.035,-2.55 -7.035,-2.55
Top Assembly:
  lines w0.1: -6.985,-2.45 6.985,-2.45 6.985,2.45 -6.985,2.45 -6.985,-2.45
Top Designator:
  text ".Designator" at -3.647,-0.357 h1
Top 3D Body:
  lines w0.1: -6.985,-2.45 -6.985,2.45 6.985,2.45 6.985,-2.45 -6.985,-2.45
Top Courtyard:
  lines w0.05: -7.235,-2.75 -7.235,5.42 7.235,5.42 7.235,-2.75 -7.235,-2.75
Top Component Center:
  lines w0.1: -0.5,0 0.5,0 ; 0,-0.5 0,0.5
3D body "62701221721.stp": height 5.08, standoff -2.37, extent -6.985,-2.45 6.985,4.92

## 62701420621 [mm] "Boc Header SMT type, 14p"
height 5.3
pads (14):
  rect 0.65x2.76 smd: 1(-3.81,-2.02) 2(-3.81,2.02) 3(-2.54,-2.02) 4(-2.54,2.02) 5(-1.27,-2.02) 6(-1.27,2.02) 7(0,-2.02) 8(0,2.02) 9(1.27,-2.02) 10(1.27,2.02) 11(2.54,-2.02) 12(2.54,2.02) 13(3.81,-2.02) 14(3.81,2.02)
Top Overlay:
  circle w0.25: c-3.82,-3.85 r0.125
  lines w0.2: -4.47,-2.6 -7.695,-2.6 -7.695,2.6 -4.47,2.6 ; 4.47,-2.6 7.695,-2.6 7.695,2.6 4.47,2.6
Top Assembly:
  lines w0.1: -1.2,-2.5 -1.2,-1.7 -6.82,-1.7 -6.82,1.7 6.82,1.7 6.82,-1.7 1.2,-1.7 1.2,-2.5 ; -7.62,-2.5 -7.62,2.5 7.62,2.5 7.62,-2.5 -7.62,-2.5
Top Designator:
  text ".Designator" at -3.647,-0.357 h1
Top 3D Body:
  lines w0.1: -1.2,-2.5 -1.2,-1.7 -6.82,-1.7 -6.82,1.7 6.82,1.7 6.82,-1.7 1.2,-1.7 1.2,-2.5 ; -7.62,-2.5 7.62,-2.5 7.62,2.5 -7.62,2.5 -7.62,-2.5
Top Courtyard:
  lines w0.05: -7.895,-3.6 -7.895,3.6 7.895,3.6 7.895,-3.6 -7.895,-3.6
Top Component Center:
  lines w0.1: -0.5,0 0.5,0 ; 0,-0.5 0,0.5
3D body "62701420621.stp": height 5.2, standoff -0.04, extent -7.62,-2.8 7.62,2.8

## 62701421621 [mm] "1.27x1.27mm Pitch Box Header Straight Type, 14p"
height 4.9
pads (14):
  round 1 hole 0.7: 1(-3.81,-0.635) 2(-3.81,0.635) 3(-2.54,-0.635) 4(-2.54,0.635) 5(-1.27,-0.635) 6(-1.27,0.635) 7(0,-0.635) 8(0,0.635) 9(1.27,-0.635) 10(1.27,0.635) 11(2.54,-0.635) 12(2.54,0.635) 13(3.81,-0.635) 14(3.81,0.635)
Top Overlay:
  circle w0.25: c-3.81,-3.035 r0.125
  lines w0.2: -7.67,-2.6 7.67,-2.6 7.67,2.6 -7.67,2.6 -7.67,-2.6
Top Assembly:
  lines w0.1: -1.2,-2.5 -1.2,-1.7 -6.82,-1.7 -6.82,1.7 6.82,1.7 6.82,-1.7 1.2,-1.7 1.2,-2.5 ; -7.62,-2.5 7.62,-2.5 7.62,2.5 -7.62,2.5 -7.62,-2.5
Top Designator:
  text ".Designator" at -3.647,-0.357 h1
Top 3D Body:
  lines w0.1: -1.2,-2.5 -1.2,-1.7 -6.82,-1.7 -6.82,1.7 6.82,1.7 6.82,-1.7 1.2,-1.7 1.2,-2.5 ; -7.62,-2.5 -7.62,2.5 7.62,2.5 7.62,-2.5 -7.62,-2.5
Top Courtyard:
  lines w0.05: -7.87,-2.8 7.87,-2.8 7.87,2.8 -7.87,2.8 -7.87,-2.8
Top Component Center:
  lines w0.1: -0.5,0 0.5,0 ; 0,-0.5 0,0.5
3D body "62701421621.stp": height 4.93, standoff -2.37, extent -7.62,-2.55 7.62,2.5

## 62701421721 [mm] "1.27x1.27mm Pitch Box Header Right Angle Type, 14p"
height 5
pads (14):
  round 1 hole 0.7: 1(3.81,4.72) 2(3.81,3.45) 3(2.54,4.72) 4(2.54,3.45) 5(1.27,4.72) 6(1.27,3.45) 7(0,4.72) 8(0,3.45) 9(-1.27,4.72) 10(-1.27,3.45) 11(-2.54,4.72) 12(-2.54,3.45) 13(-3.81,4.72) 14(-3.81,3.45)
Top Overlay:
  lines w0.2: -7.67,-2.55 7.67,-2.55 7.67,2.55 -7.67,2.55 -7.67,-2.55
Top Assembly:
  lines w0.1: -7.62,-2.45 -7.62,2.45 7.62,2.45 7.62,-2.45 -7.62,-2.45
Top Designator:
  text ".Designator" at -3.647,-0.357 h1
Top 3D Body:
  lines w0.1: -7.62,-2.45 7.62,-2.45 7.62,2.45 -7.62,2.45 -7.62,-2.45
Top Courtyard:
  lines w0.05: -7.87,-2.75 7.87,-2.75 7.87,5.42 -7.87,5.42 -7.87,-2.75
Top Component Center:
  lines w0.1: -0.5,0 0.5,0 ; 0,-0.5 0,0.5
3D body "62701421721.stp": height 5.08, standoff -2.37, extent -7.62,-2.45 7.62,4.92

## 62701620621 [mm] "Boc Header SMT type, 16p"
height 5.3
pads (16):
  rect 0.65x2.76 smd: 1(-4.445,-2.02) 2(-4.445,2.02) 3(-3.175,-2.02) 4(-3.175,2.02) 5(-1.905,-2.02) 6(-1.905,2.02) 7(-0.635,-2.02) 8(-0.635,2.02) 9(0.635,-2.02) 10(0.635,2.02) 11(1.905,-2.02) 12(1.905,2.02) 13(3.175,-2.02) 14(3.175,2.02) 15(4.445,-2.02) 16(4.445,2.02)
Top Overlay:
  circle w0.25: c-4.455,-3.85 r0.125
  lines w0.2: -5.105,-2.6 -8.33,-2.6 -8.33,2.6 -5.105,2.6 ; 5.105,-2.6 8.33,-2.6 8.33,2.6 5.105,2.6
Top Assembly:
  lines w0.1: -1.2,-2.5 -1.2,-1.7 -7.455,-1.7 -7.455,1.7 7.455,1.7 7.455,-1.7 1.2,-1.7 1.2,-2.5 ; -8.255,-2.5 -8.255,2.5 8.255,2.5 8.255,-2.5 -8.255,-2.5
Top Designator:
  text ".Designator" at -3.647,-0.357 h1
Top 3D Body:
  lines w0.1: -1.2,-2.5 -1.2,-1.7 -7.455,-1.7 -7.455,1.7 7.455,1.7 7.455,-1.7 1.2,-1.7 1.2,-2.5 ; -8.255,-2.5 8.255,-2.5 8.255,2.5 -8.255,2.5 -8.255,-2.5
Top Courtyard:
  lines w0.05: -8.53,-3.6 -8.53,3.6 8.53,3.6 8.53,-3.6 -8.53,-3.6
Top Component Center:
  lines w0.1: -0.5,0 0.5,0 ; 0,-0.5 0,0.5
3D body "62701620621.stp": height 5.2, standoff -0.04, extent -8.255,-2.8 8.255,2.8

## 62701621621 [mm] "1.27x1.27mm Pitch Box Header Straight Type, 16p"
height 4.9
pads (16):
  round 1 hole 0.7: 1(-4.445,-0.635) 2(-4.445,0.635) 3(-3.175,-0.635) 4(-3.175,0.635) 5(-1.905,-0.635) 6(-1.905,0.635) 7(-0.635,-0.635) 8(-0.635,0.635) 9(0.635,-0.635) 10(0.635,0.635) 11(1.905,-0.635) 12(1.905,0.635) 13(3.175,-0.635) 14(3.175,0.635) 15(4.445,-0.635) 16(4.445,0.635)
Top Overlay:
  circle w0.25: c-4.445,-3.035 r0.125
  lines w0.2: -8.305,-2.6 8.305,-2.6 8.305,2.6 -8.305,2.6 -8.305,-2.6
Top Assembly:
  lines w0.1: -1.2,-2.5 -1.2,-1.7 -7.455,-1.7 -7.455,1.7 7.455,1.7 7.455,-1.7 1.2,-1.7 1.2,-2.5 ; -8.255,-2.5 8.255,-2.5 8.255,2.5 -8.255,2.5 -8.255,-2.5
Top Designator:
  text ".Designator" at -3.647,-0.357 h1
Top 3D Body:
  lines w0.1: -1.2,-2.5 -1.2,-1.7 -7.455,-1.7 -7.455,1.7 7.455,1.7 7.455,-1.7 1.2,-1.7 1.2,-2.5 ; -8.255,-2.5 -8.255,2.5 8.255,2.5 8.255,-2.5 -8.255,-2.5
Top Courtyard:
  lines w0.05: -8.505,-2.8 8.505,-2.8 8.505,2.8 -8.505,2.8 -8.505,-2.8
Top Component Center:
  lines w0.1: -0.5,0 0.5,0 ; 0,-0.5 0,0.5
3D body "62701621621.stp": height 4.93, standoff -2.37, extent -8.255,-2.55 8.255,2.5